# Altium footprint library CHIP-Library.PcbLib: 345 footprints (part 9 of 22)
Each footprint in its own frame and in the unit in brackets; x right, y up, seen from the top. Pads: shape width x height; smd on the part's side, far side on the other; paste and mask are expansions set on the pad; w line width, h text height; cw(c..) or ccw(c..) is an arc to the next point about the centre after c.
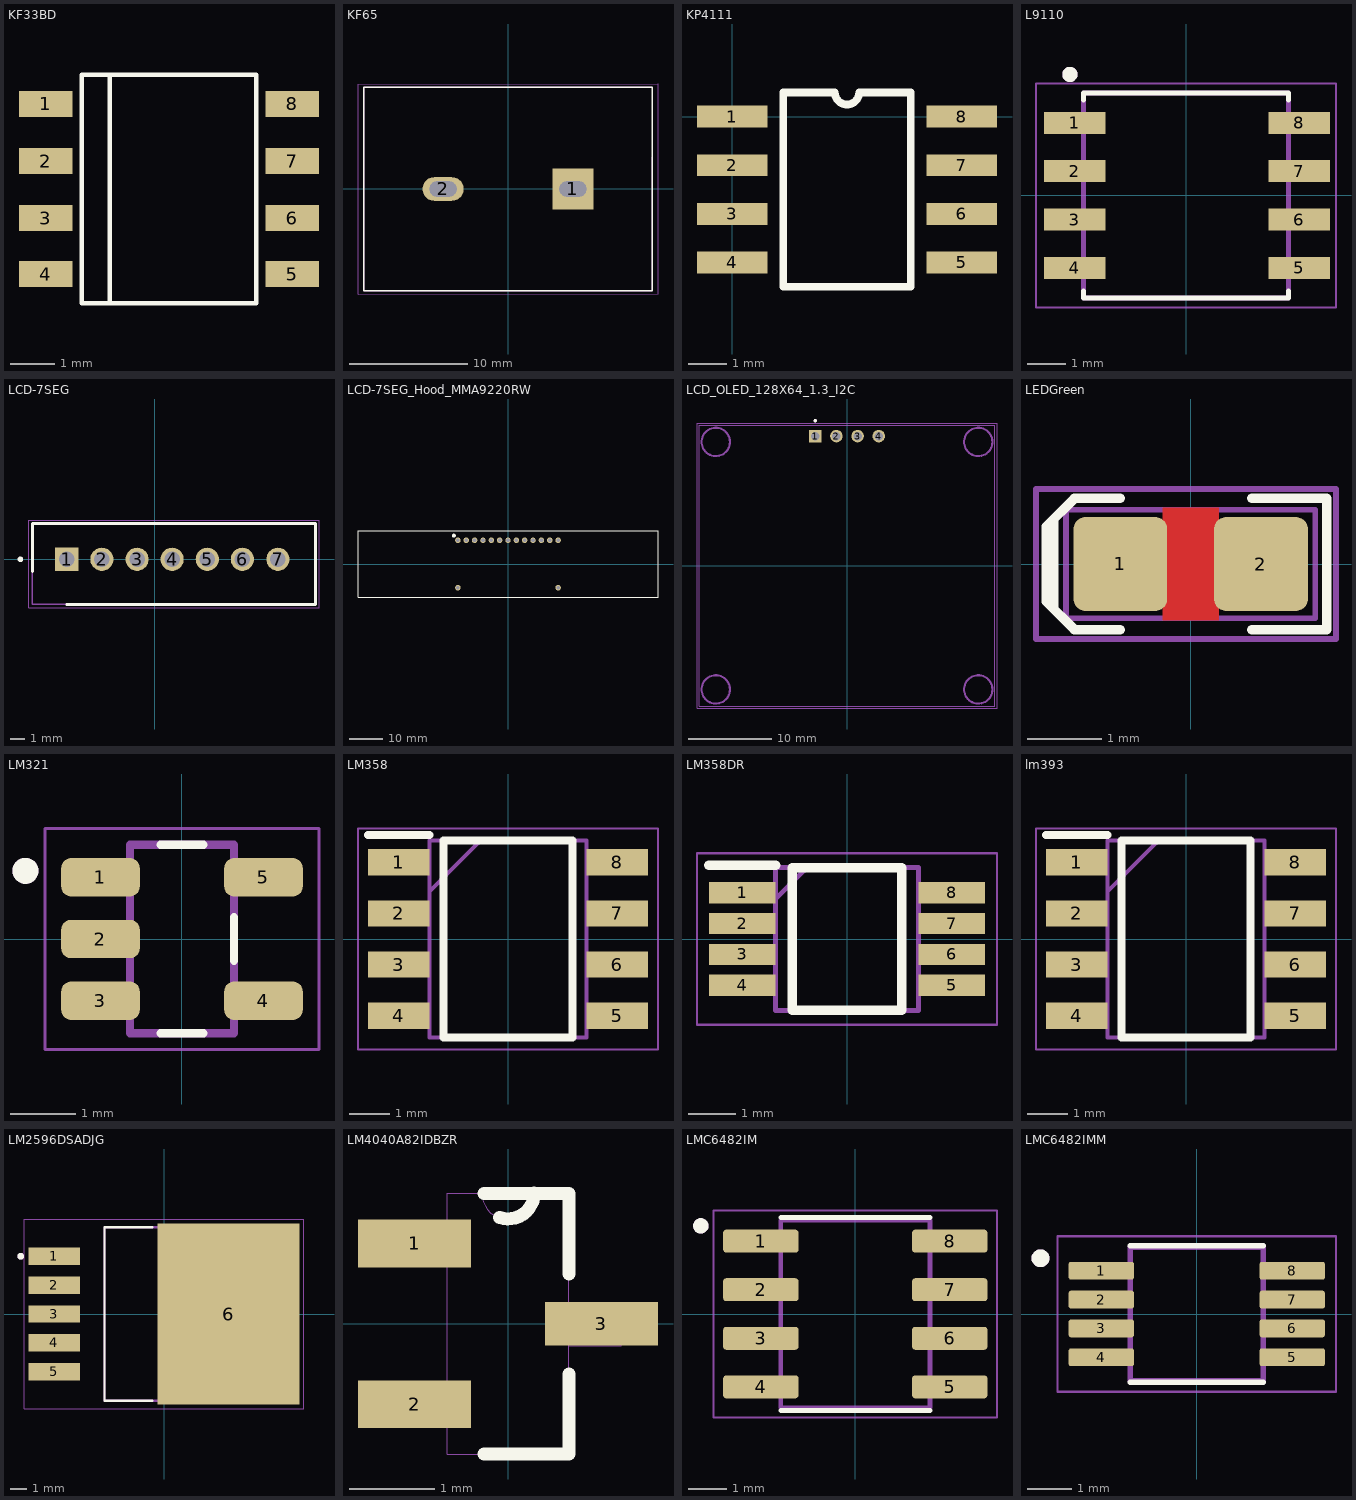
[diagram p8: the footprints below, top view; thin cyan lines are the x and y axes]

## KF33BD [mm]
pads (8):
  rect 1.2x0.58 smd: 1(1.2,-2.05) 2(1.2,-3.325) 3(1.2,-4.6) 4(1.2,-5.85) 5(6.7,-5.85) 6(6.7,-4.6) 7(6.7,-3.325) 8(6.7,-2.05)
Top Overlay:
  lines w0.1: 2.625,-6.5 2.625,-1.4 ; 2,-6.5 5.9,-6.5 5.9,-1.4 2,-1.4 2,-6.5
3D body "KF33BD.step": height 1.45, standoff 0, extent 1.111,-6.4 6.889,-1.498

## KF65 [mm]
pads (2):
  rect 3.5x3.5 hole 1.3 slot 2.3 at 0 deg: 1(5.5,0)
  oval 3.5x2 hole 1.3 slot 2.3 at 0 deg: 2(-5.5,0)
Top Overlay:
  circle w0.2: c4.632,-0.077 r0.1
  lines w0.127: -12.2,-8.6 12.2,-8.6 12.2,8.6 -12.2,8.6 -12.2,-8.6
Mechanical 13:
  circle w0.2: c4.632,-0.077 r0.1
  lines w0.127: 12.2,2.673 12.2,-8.6 -12.2,-8.6 -12.2,8.6 12.2,8.6
Mechanical 15:
  lines w0.05: -12.7,8.854 -12.7,-8.89 12.7,-8.89 12.7,8.89 -12.7,8.89

## KP4111 [mm] "Secondary Side Synchronous Rectifier  SOP-8"
height 1.91
pads (8):
  rect 1.85x0.575 smd: 1(0,0) 2(0,-1.27) 3(0,-2.54) 4(0,-3.81) 5(6,-3.81) 6(6,-2.54) 7(6,-1.27) 8(6,0)
Top Overlay:
  lines w0.2: 1.335,-4.445 1.335,0.635 2.682,0.635 ccw(c3,0.635) 3.317,0.635 4.665,0.635 4.665,-4.445 1.335,-4.445
3D body "User Library-sop8_model.STEP": height 1.55, standoff -0.01, extent 0.084,-4.316 6.064,0.584

## L9110 [mm]
pads (8):
  rect 1.61x0.58 smd: 1(-2.921,1.905) 2(-2.921,0.635) 3(-2.921,-0.635) 4(-2.921,-1.905) 5(2.97,-1.905) 6(2.97,-0.635) 7(2.97,0.635) 8(2.97,1.905)
Top Overlay:
  circle w0.2: c-3.048,3.175 r0.1
  lines w0.127: -2.69,-2.51 -2.69,-2.69 2.69,-2.69 2.69,-2.51 ; -2.69,2.5 -2.69,2.69 2.69,2.69 2.69,2.5
Mechanical 4:
  circle w0.2: c-3.048,3.175 r0.1
  circle w0.2: c-3.048,3.175 r0.1
  lines w0.127: -2.69,-2.69 2.69,-2.69 ; -2.69,-2.69 -2.69,2.69 ; -2.69,-2.69 2.69,-2.69 ; -2.69,-2.69 -2.69,2.69 ; -2.69,2.69 2.69,2.69 ; -2.69,2.69 2.69,2.69 ; 2.69,-2.69 2.69,2.69 ; 2.69,-2.69 2.69,2.69
Mechanical 16:
  lines w0.05: -3.937,-2.94 3.937,-2.94 3.937,2.94 -3.937,2.94 -3.937,-2.94
3D body "User Library-so8-3.STEP": height 1.7, standoff 0, extent -3,-2.45 3,2.45

## LCD-7SEG [mm]
pads (7):
  rect 1.65x1.65 hole 1.1: 1(-6.27,0)
  round 1.65 hole 1.1: 2(-3.77,0) 3(-1.27,0) 4(1.23,0) 5(3.73,0) 6(6.23,0) 7(8.763,0)
Top Overlay:
  circle w0.2: c-9.572,0 r0.1
  lines w0.2: -8.72,-0.86 -8.72,2.54 11.43,2.54 11.43,-3.21 -6.27,-3.21
Mechanical 13:
  lines w0.1: -8.72,-3.21 11.43,-3.21 11.43,2.54 -8.72,2.54 -8.72,-3.21
Mechanical 15:
  lines w0.05: -8.97,-3.46 11.684,-3.46 11.684,2.79 -8.97,2.79 -8.97,-3.46
3D body "end-el-san Co Ltd-King Bright CX25-12.step": height 11.01, standoff 0.01, extent -16.984,-6.477 19.016,2.523

## LCD-7SEG_Hood_MMA9220RW [mm] "MMA9220RW"
pads (15):
  round 1.65 hole 1.1: 1(-15.033,7.12) 2(-12.533,7.12) 3(-10.033,7.12) 4(-7.5,7.12) 5(-5,7.12) 6(-2.5,7.12) 7(0,7.12) 8(2.5,7.12) 9(5,7.12) 10(7.5,7.12) 11(10.033,7.12) 12(12.533,7.12) 13(15.033,7.12) 14(-15.033,-7.12) 15(15.033,-7.12)
Top Overlay:
  circle w1: c-16.256,8.509 r0.1
  lines w0.2: -45,-10 45,-10 45,10 -45,10 -45,-10
3D body "end-el-san Co Ltd-King Bright CX25-12.step": height 5.51, standoff -3.49, extent -18,-5.5 18,5.5

## LCD_OLED_128X64_1.3_I2C [mm]
pads (4):
  rect 1.508x1.508 / inner round 1.508 / far side rect 1.508x1.508 hole 1: 1(-3.81,15.55)
  round 1.508 hole 1: 2(-1.27,15.55) 3(1.27,15.55) 4(3.81,15.55)
Top Overlay:
  circle w0.2: c-3.81,17.4 r0.1
Mechanical 1:
  lines w0.127: -17.75,-16.85 17.75,-16.85 17.75,16.85 -17.75,16.85 -17.75,-16.85
  lines w0.254: -14.049,-14.85 cw(c-15.75,-14.85) -14.049,-14.841 ; -14.049,14.85 cw(c-15.75,14.85) -14.049,14.859 ; 17.451,-14.85 cw(c15.75,-14.85) 17.451,-14.841 ; 17.451,14.85 cw(c15.75,14.85) 17.451,14.859
Mechanical 13:
  circle w0.2: c-3.81,17.4 r0.1
  lines w0.127: -17.75,-16.85 17.75,-16.85 17.75,16.85 -17.75,16.85 -17.75,-16.85
Mechanical 15:
  lines w0.05: -18,-17.1 -18,17.1 18,17.1 18,-17.1 -18,-17.1
3D body "OLED.step": height 2.3, standoff 0, extent -17.45,-16.55 17.25,16.75

## LEDGreen [mil]
height 170.08
pads (2):
  rrect25% 50x50 smd: 1(-37.5,0) 2(37.5,0)
Top Layer:
  pour cut-out: 15,-30 -15,-30 -15,30 15,30
Top Overlay:
  lines w5: -73,-24 -73,24 ; -37.5,-35 -62,-35 -77,-20 -77,20 -62,35 -37.5,35 ; 32.5,-35 72.5,-35 72.5,35 32.5,35
Mechanical 13:
  lines w3: -66.5,-29 -66.5,29 66.5,29 66.5,-29 -66.5,-29
Mechanical 15:
  lines w3: -82.5,-40 -82.5,40 77.5,40 77.5,-40 -82.5,-40
3D body "User Library-LED_0603_G.STEP": height 23.62, standoff -0.08, extent -31.49,-15.74 31.51,15.76

## LM321 [mm] "SOT23-5"
height 1.91
pads (5):
  rrect50% 1.21x0.59 smd: 1(-1.255,0.95) 2(-1.255,0) 3(-1.255,-0.95) 4(1.255,-0.95) 5(1.255,0.95)
Top Overlay:
  circle w0.2: c-2.41,1.05 r0.1
  lines w0.127: -0.33,-1.45 0.33,-1.45 ; -0.33,1.45 0.33,1.45 ; 0.8,-0.335 0.8,0.335
Mechanical 13:
  circle w0.2: c-2.41,1.05 r0.1
  lines w0.127: -0.8,-1.45 0.8,-1.45 0.8,1.45 -0.8,1.45 -0.8,-1.45
Mechanical 15:
  lines w0.05: -2.11,-1.7 -2.11,1.7 2.11,1.7 2.11,-1.7 -2.11,-1.7
3D body "TPS73225DBVR--3DModel-STEP-56544.STEP": height 1.43, standoff -0.03, extent -1.4,-1.45 1.4,1.45

## LM358 [mm]
pads (8):
  rect 1.525x0.65 smd: 1(-2.712,1.905) 2(-2.712,0.635) 3(-2.712,-0.635) 4(-2.712,-1.905) 5(2.712,-1.905) 6(2.712,-0.635) 7(2.712,0.635) 8(2.712,1.905)
Top Overlay:
  lines w0.2: -3.475,2.58 -1.95,2.58 ; -1.6,-2.45 -1.6,2.45 1.6,2.45 1.6,-2.45 -1.6,-2.45
Mechanical 13:
  lines w0.1: -1.95,1.18 -0.68,2.45 ; -1.95,-2.45 -1.95,2.45 1.95,2.45 1.95,-2.45 -1.95,-2.45
Mechanical 15:
  lines w0.05: -3.725,-2.75 -3.725,2.75 3.725,2.75 3.725,-2.75 -3.725,-2.75
3D body "FR9886SOGTR.stp": height 1.75, standoff 0, extent -3,-2.45 3,2.45

## LM358DR [mm]
pads (8):
  rect 1.4x0.45 smd: 1(-2.2,0.975) 2(-2.2,0.325) 3(-2.2,-0.325) 4(-2.2,-0.975) 5(2.2,-0.975) 6(2.2,-0.325) 7(2.2,0.325) 8(2.2,0.975)
Top Overlay:
  lines w0.2: -2.9,1.55 -1.5,1.55 ; -1.15,-1.5 -1.15,1.5 1.15,1.5 1.15,-1.5 -1.15,-1.5
Mechanical 13:
  lines w0.1: -1.5,0.85 -0.85,1.5 ; -1.5,-1.5 -1.5,1.5 1.5,1.5 1.5,-1.5 -1.5,-1.5
Mechanical 15:
  lines w0.05: -3.15,-1.8 -3.15,1.8 3.15,1.8 3.15,-1.8 -3.15,-1.8
3D body "LM358DGKR.stp": height 1.1, standoff 0, extent -2.45,-1.5 2.45,1.5

## lm393 [mm]
pads (8):
  rect 1.525x0.65 smd: 1(-2.712,1.905) 2(-2.712,0.635) 3(-2.712,-0.635) 4(-2.712,-1.905) 5(2.712,-1.905) 6(2.712,-0.635) 7(2.712,0.635) 8(2.712,1.905)
Top Overlay:
  lines w0.2: -3.475,2.58 -1.95,2.58 ; -1.6,-2.45 1.6,-2.45 1.6,2.45 -1.6,2.45 -1.6,-2.45
Mechanical 13:
  lines w0.1: -1.95,1.18 -0.68,2.45 ; -1.95,-2.45 1.95,-2.45 1.95,2.45 -1.95,2.45 -1.95,-2.45
Mechanical 15:
  lines w0.05: -3.725,-2.75 3.725,-2.75 3.725,2.75 -3.725,2.75 -3.725,-2.75
3D body "LM393ADT.stp": height 1.75, standoff 0, extent -3,-2.45 3,2.45

## LM2596DSADJG [mm] "D2PACK"
pads (6):
  rect 3.05x1.016 smd: 1(-6.485,3.404) 2(-6.485,1.702) 3(-6.485,0) 4(-6.485,-1.702) 5(-6.485,-3.404)
  rect 8.38x10.66 smd paste-4.19: 6(3.82,0)
Top Overlay:
  circle w0.2: c-8.46,3.404 r0.1
  lines w0.127: -0.69,-5.118 -3.517,-5.118 -3.517,5.118 -0.69,5.118
Top Paste:
  region: 5.501,-1.723 7.151,-1.723 7.151,-2.923 5.501,-2.923
  region: 0.489,-1.723 2.139,-1.723 2.139,-2.923 0.489,-2.923
  region: 2.995,-1.723 4.645,-1.723 4.645,-2.923 2.995,-2.923
  region: 5.501,-3.271 7.151,-3.271 7.151,-4.471 5.501,-4.471
  region: 0.489,-3.271 2.139,-3.271 2.139,-4.471 0.489,-4.471
  region: 2.995,-3.271 4.645,-3.271 4.645,-4.471 2.995,-4.471
  region: 5.501,-0.174 7.151,-0.174 7.151,-1.374 5.501,-1.374
  region: 0.489,-0.174 2.139,-0.174 2.139,-1.374 0.489,-1.374
  region: 2.995,-0.174 4.645,-0.174 4.645,-1.374 2.995,-1.374
  region: 5.501,1.374 7.151,1.374 7.151,0.174 5.501,0.174
  region: 0.489,1.374 2.139,1.374 2.139,0.174 0.489,0.174
  region: 2.995,1.374 4.645,1.374 4.645,0.174 2.995,0.174
  region: 5.501,2.923 7.151,2.923 7.151,1.723 5.501,1.723
  region: 0.489,2.923 2.139,2.923 2.139,1.723 0.489,1.723
  region: 2.995,2.923 4.645,2.923 4.645,1.723 2.995,1.723
  region: 5.501,4.471 7.151,4.471 7.151,3.271 5.501,3.271
  region: 0.489,4.471 2.139,4.471 2.139,3.271 0.489,3.271
  region: 2.995,4.471 4.645,4.471 4.645,3.271 2.995,3.271
Mechanical 4:
  circle w0.2: c-8.46,3.404 r0.1
  circle w0.2: c-8.46,3.404 r0.1
  lines w0.127: -3.517,-5.118 5.83,-5.118 ; -3.517,-5.118 -3.517,5.118 ; -3.517,-5.118 5.83,-5.118 ; -3.517,-5.118 -3.517,5.118 ; -3.517,5.118 5.83,5.118 ; -3.517,5.118 5.83,5.118 ; 5.83,-5.118 5.83,5.118 ; 5.83,-5.118 5.83,5.118
Mechanical 16:
  lines w0.05: -8.26,-5.58 8.26,-5.58 8.26,5.58 -8.26,5.58 -8.26,-5.58
3D body "User Library-TO-263 5Ld.step": height 4.57, standoff -0.01, extent -7.701,-5.08 6.939,5.08

## LM4040A82IDBZR [mil]
pads (3):
  rect 52x22 smd: 1(-43,37) 2(-43,-37)
  rect 52x20 smd: 3(43,0)
Top Overlay:
  lines w6: -11,-60 28,-60 28,-23 ; -11,60 12,60 28,60 28,23 ; -3.9,48.96 ccw(c0.15,60.1) 12,60.1
Mechanical 1:
  lines w0: -28,-47 -52,-47 -52,-28 -28,-28 ; -28,-47 -28,-28 ; -28,-47 -28,-60 28,-60 28,-10 ; -28,-28 -28,28 ; -28,28 -52,28 -52,47 -28,47 ; -28,28 -28,47 ; -28,47 -28,60 -12,60 ; -12,60 ccw(c0,60) 12,60 ; -12,60 12,60 ; 12,60 28,60 28,10 ; 28,-10 52,-10 52,10 28,10 ; 28,-10 28,10

## LMC6482IM [mm]
pads (8):
  rrect25% 1.97x0.6 smd: 1(-2.47,1.905) 2(-2.47,0.635) 3(-2.47,-0.635) 4(-2.47,-1.905) 5(2.47,-1.905) 6(2.47,-0.635) 7(2.47,0.635) 8(2.47,1.905)
Top Overlay:
  circle w0.2: c-4.04,2.305 r0.1
  lines w0.127: -1.95,-2.525 1.95,-2.525 ; -1.95,2.525 1.95,2.525
Mechanical 13:
  circle w0.2: c-4.04,2.305 r0.1
  lines w0.127: -1.95,-2.452 1.95,-2.452 1.95,2.452 -1.95,2.452 -1.95,-2.452
Mechanical 15:
  lines w0.05: -3.705,-2.702 3.705,-2.702 3.705,2.702 -3.705,2.702 -3.705,-2.702
3D body "step_temp.STEP": height 1.75, standoff 0, extent -2.997,-2.451 2.997,2.451

## LMC6482IMM [mm]
pads (8):
  rrect25% 1.47x0.4 smd: 1(-2.15,0.975) 2(-2.15,0.325) 3(-2.15,-0.325) 4(-2.15,-0.975) 5(2.15,-0.975) 6(2.15,-0.325) 7(2.15,0.325) 8(2.15,0.975)
Top Overlay:
  circle w0.2: c-3.52,1.255 r0.1
  lines w0.127: -1.5,-1.535 1.5,-1.535 ; -1.5,1.535 1.5,1.535
Mechanical 13:
  circle w0.2: c-3.52,1.255 r0.1
  lines w0.127: -1.5,-1.5 1.5,-1.5 1.5,1.5 -1.5,1.5 -1.5,-1.5
Mechanical 15:
  lines w0.05: -3.135,-1.75 3.135,-1.75 3.135,1.75 -3.135,1.75 -3.135,-1.75
3D body "step_temp.STEP": height 1.1, standoff 0, extent -2.45,-1.5 2.45,1.5